# Altium footprint library rus.PcbLib: 72 footprints (part 3 of 5)
Each footprint in its own frame and in the unit in brackets; x right, y up, seen from the top. Pads: shape width x height; smd on the part's side, far side on the other; paste and mask are expansions set on the pad; w line width, h text height; cw(c..) or ccw(c..) is an arc to the next point about the centre after c.
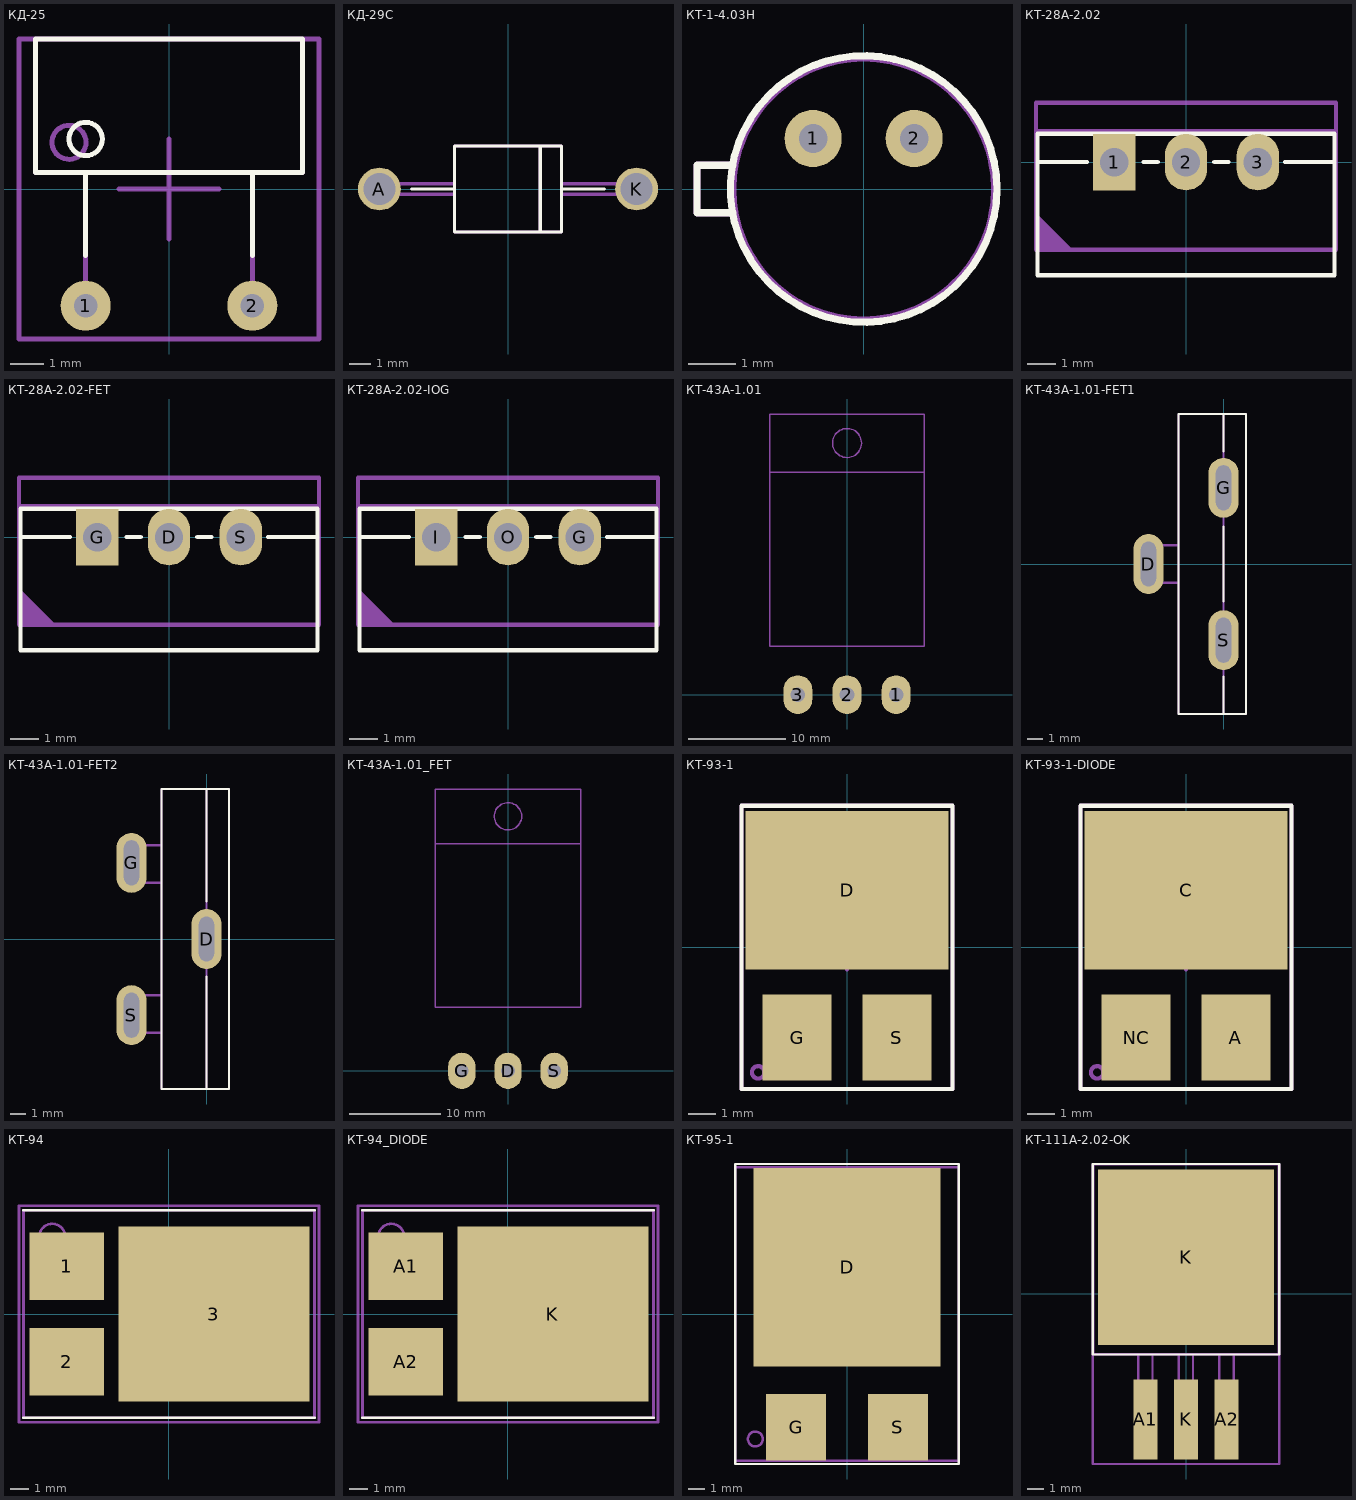
[diagram p2: the footprints below, top view; thin cyan lines are the x and y axes]

## КД-25 [mm]
height 4
pads (2):
  round 1.5 hole 0.7: 1(-2.5,-3.5) 2(2.5,-3.5)
Top Overlay:
  circle w0.15: c-2.5,1.5 r0.5
  lines w0.15: -2.5,-2 -2.5,0.5 ; 2.5,-2 2.5,0.5 ; -4,0.5 4,0.5 4,4.5 -4,4.5 -4,0.5
Mechanical 15:
  lines w0.15: -1.5,0 1.5,0 ; 0,-1.5 0,1.5 ; -4.5,-4.5 -4.5,4.5 4.5,4.5 4.5,-4.5 -4.5,-4.5
Mechanical 29:
  circle w0.15: c-3,1.4 r0.51
  lines w0.15: -2.5,-3.5 -2.5,0.5 ; 2.5,-3.5 2.5,0.5 ; -4,0.5 -4,4.5 4,4.5 4,0.5 -4,0.5
  text ".Designator" at -3.4,2.6 h1
3D body "КД-25.STEP": height 4, standoff -3, extent -4,-3.765 4,4.5

## КД-29С [mm]
height 5
pads (2):
  round 2 hole 1.5: A(-6,0) K(6,0)
Top Overlay:
  lines w0.15: -4.5,0 -2.5,0 ; 1.5,-2 1.5,2 ; 4.5,0 2.5,0 ; 2.5,0 2.5,-2 -2.5,-2 -2.5,2 2.5,2 2.5,0
Mechanical 29:
  lines w0.15: 1.5,-2 1.5,2 ; 2.5,-0.25 6,-0.25 6,0.25 2.5,0.25 ; -6,-0.25 -6,0.25 -2.5,0.25 -2.5,-0.25 -6,-0.25 ; -2.5,-2 -2.5,2 2.5,2 2.5,-2 -2.5,-2
  text ".Designator" at -2.3,-0.4 h1
3D body: height 4.3, standoff 0.7, extent -2.25,-1.799 2.15,1.8

## КТ-1-4.03Н [mm]
height 20
pads (2):
  round 1.2 hole 0.6: 1(-1.061,1.061) 2(1.061,1.061)
Top Overlay:
  circle w0.15: c0,0 r2.8
  lines w0.15: -2.75,-0.5 -3,-0.5 -3.5,-0.5 -3.5,0.5 -3,0.5 -2.75,0.5
Mechanical 29:
  circle w0.15: c0,0 r2.75
  lines w0.15: -2.75,-0.5 -3.5,-0.5 -3.5,0.5 -2.75,0.5
  text ".Designator" at -2.3,-0.4 h1
3D body: height 11, standoff -4, extent -1.259,0.861 -0.86,1.26
3D body: height 11, standoff -4, extent 0.862,0.861 1.261,1.26
3D body: height 15, standoff 10, extent -2.4,-2.399 2.4,2.399
3D body: height 10.5, standoff 10, extent -3.501,-2.801 2.801,2.801

## КТ-28А-2.02 [mm]
pads (3):
  rect 1.5x2 hole 1: 1(-2.54,0)
  oval 1.5x2 hole 1: 2(0,0) 3(2.54,0)
Top Overlay:
  lines w0.15: -5.25,0 -3.5,0 ; -1.5,0 -1,0 ; 1,0 1.5,0 ; 3.5,0 5.25,0 ; -5.25,-4 -5.25,-0.25 -5.25,1 5.25,1 5.25,-0.25 5.25,-4 0,-4 -5.25,-4
Mechanical 29:
  region: -5.3,-1.8 -5.3,-3.1 -4,-3.1
  lines w0.15: -5.3,1.1 5.3,1.1 ; -5.3,-3.1 5.3,-3.1 5.3,2.1 -5.3,2.1 -5.3,-3.1
  text ".Designator" at -3.7,-1.1 h1
3D body "KT-28F-2_02_6_5mm.step": height 22.5, standoff -2.5, extent -5.4,-3 5.4,2.2

## КТ-28А-2.02-FET [mm]
pads (3):
  oval 1.5x2 hole 1: D(0,0) S(2.54,0)
  rect 1.5x2 hole 1: G(-2.54,0)
Top Overlay:
  lines w0.15: -5.25,0 -3.5,0 ; -1.5,0 -1,0 ; 1,0 1.5,0 ; 3.5,0 5.25,0 ; -5.25,-4 0,-4 5.25,-4 5.25,-0.25 5.25,1 -5.25,1 -5.25,-0.25 -5.25,-4
Mechanical 29:
  region: -5.3,-1.8 -5.3,-3.1 -4,-3.1
  lines w0.15: -5.3,1.1 5.3,1.1 ; -5.3,-3.1 -5.3,2.1 5.3,2.1 5.3,-3.1 -5.3,-3.1
  text ".Designator" at -3.3,-1.1 h1
3D body "KT-28F-2_02_6_5mm.step": height 22.5, standoff -2.5, extent -5.4,-3 5.4,2.2

## КТ-28А-2.02-IOG [mm]
pads (3):
  oval 1.5x2 hole 1: G(2.54,0) O(0,0)
  rect 1.5x2 hole 1: I(-2.54,0)
Top Overlay:
  lines w0.15: -5.25,0 -3.5,0 ; -1.5,0 -1,0 ; 1,0 1.5,0 ; 3.5,0 5.25,0 ; -5.25,-4 -5.25,-0.25 -5.25,1 5.25,1 5.25,-0.25 5.25,-4 0,-4 -5.25,-4
Mechanical 29:
  region: -5.3,-1.8 -5.3,-3.1 -4,-3.1
  lines w0.15: -5.3,1.1 5.3,1.1 ; -5.3,-3.1 5.3,-3.1 5.3,2.1 -5.3,2.1 -5.3,-3.1
  text ".Designator" at -3.1,-1.2 h1
3D body "KT-28F-2_02_6_5mm.step": height 22.5, standoff -2.5, extent -5.4,-3 5.4,2.2

## КТ-43А-1.01 [mm]
height 5.3
pads (3):
  oval 3x4 hole 1.5: 1(5.08,0) 2(0,0) 3(-5.08,0)
Mechanical 13:
  circle w0.15: c0,26 r1.5
Mechanical 29:
  lines w0.15: -8,23 0,23 8,23 ; -8,5 -8,29 0,29 8,29 8,5 0,5 -8,5
  text ".Designator" at -2.7,14 h1
3D body "КТ-43А-1.01.STEP": height 3, standoff -7.3, extent -7.8,-0.25 7.8,28.75

## КТ-43А-1.01-FET1 [mm]
height 30
pads (3):
  oval 2x4 hole 1 slot 3 at 90 deg: D(-5,0) G(0,5.08) S(0,-5.08)
Top Overlay:
  lines w0.15: 0,-7.5 0,-10 ; 0,-2.5 0,2.5 ; 0,7.5 0,10 ; 0,-10 -3,-10 -3,10 0,10 ; 0,-10 1.5,-10 1.5,-7.5 1.5,7.5 1.5,8.5 1.5,10 0,10
Mechanical 29:
  lines w0.15: -3,-1.25 -5.25,-1.25 -5.25,1.25 -3,1.25 ; 0,-10 0,10 1.5,10 ; 1.5,10 1.5,-10 -3,-10 -3,10 1.5,10
  text ".Designator" at -1,-3.5 h1
3D body "КТ-43А-1.01-flex1.STEP": height 32, standoff -1.4, extent -5.2,-10 1.3,10

## КТ-43А-1.01-FET2 [mm]
height 30
pads (3):
  oval 2x4 hole 1 slot 3 at 90 deg: D(0,0) G(-5,5.08) S(-5,-5.08)
Top Overlay:
  lines w0.15: -0.1,10 1.25,10 1.5,10 1.5,-7.5 1.5,-10 0,-10 ; 0,-2.5 0,-10 ; 0,2.5 0,10 -3,10 -3,-10 0,-10
Mechanical 29:
  lines w0.15: -3,-6.25 -5.25,-6.25 -5.25,-3.75 -3,-3.75 ; -3,3.75 -5.25,3.75 -5.25,6.25 -3,6.25 ; 0,-10 0,10 1.5,10 ; 1.5,10 -3,10 -3,-10 1.5,-10 1.5,10
  text ".Designator" at -1.1,-3.4 h1
3D body "KT-43A-1.01-flex2.STEP": height 32, standoff -1.4, extent -5.3,-10 1.2,10

## КТ-43А-1.01_FET [mm] "КТ-43А-1.01 для полевых транзисторов"
height 5.3
pads (3):
  oval 3x4 hole 1.5: D(0,0) G(-5.08,0) S(5.08,0)
Mechanical 13:
  circle w0.15: c0,28 r1.5
Mechanical 29:
  lines w0.15: -8,25 0,25 8,25 ; -8,7 -8,31 0,31 8,31 8,7 0,7 -8,7
  text ".Designator" at -3.5,15.3 h1
3D body "КТ-43А-1.01.STEP": height 3, standoff -7.3, extent -7.8,-0.3 7.8,30.7

## КТ-93-1 [mm]
height 3
pads (3):
  rect 7.3x5.7 smd: D(0,2.05)
  rect 2.5x3.1 smd: G(-1.8,-3.25) S(1.8,-3.25)
Top Overlay:
  lines w0.15: -3.8,-5.1 -3.8,5.1 3.8,5.1 3.8,-5.1 -3.8,-5.1
Mechanical 15:
  lines w0.15: -0.9,0 0.9,0 ; 0,-0.8 0,0.8
Mechanical 29:
  circle w0.15: c-3.2,-4.5 r0.224
  lines w0.15: -3.8,-5.1 3.8,-5.1 3.8,5.1 -3.8,5.1 -3.8,-5.1
  text ".Designator" at -3.4,-0.3 h1
3D body: height 3, standoff 0, extent -3.85,-5.15 3.85,5.15

## КТ-93-1-DIODE [mm]
height 3
pads (3):
  rect 2.5x3.1 smd: A(1.8,-3.25) NC(-1.8,-3.25)
  rect 7.3x5.7 smd: C(0,2.05)
Top Overlay:
  lines w0.15: -3.8,-5.1 3.8,-5.1 3.8,5.1 -3.8,5.1 -3.8,-5.1
Mechanical 15:
  lines w0.15: -0.9,0 0.9,0 ; 0,-0.8 0,0.8
Mechanical 29:
  circle w0.15: c-3.2,-4.5 r0.224
  lines w0.15: -3.8,-5.1 -3.8,5.1 3.8,5.1 3.8,-5.1 -3.8,-5.1
  text ".Designator" at -2.7,-0.3 h1
3D body: height 3, standoff 0, extent -3.85,-5.15 3.85,5.15

## КТ-94 [mm] "DFN, 3-Leads, Body 11,53x16,10mm, Pitch 8,00mm, IPC Medium Density"
height 3.6
pads (3):
  rect 4.15x3.75 smd: 1(-5.7,2.665) 2(-5.7,-2.665)
  rect 10.65x9.75 smd: 3(2.5,0)
Top Overlay:
  lines w0.15: -8.1,-5.775 8.1,-5.775 ; -8.1,5.775 8.1,5.775
Mechanical 15:
  lines w0.15: -0.5,0 0.5,0 ; 0,-0.5 0,0.5 ; -8.35,-6.025 -8.35,6.025 8.35,6.025 8.35,-6.025 -8.35,-6.025
Mechanical 29:
  circle w0.15: c-6.5,4.3 r0.721
  lines w0.15: -8.1,-5.775 -8.1,5.775 8.1,5.775 8.1,-5.775 -8.1,-5.775
  text ".Designator" at -4.5,-0.7 h1
3D body: height 3.6, standoff 0.5, extent -8.1,-5.775 8.1,5.775

## КТ-94_DIODE [mm] "DFN, 3-Leads, Body 11,53x16,10mm, Pitch 8,00mm, IPC Medium Density"
height 3.6
pads (3):
  rect 4.15x3.75 smd: A1(-5.7,2.665) A2(-5.7,-2.665)
  rect 10.65x9.75 smd: K(2.5,0)
Top Overlay:
  lines w0.15: -8.1,-5.775 8.1,-5.775 ; -8.1,5.775 8.1,5.775
Mechanical 15:
  lines w0.15: -0.5,0 0.5,0 ; 0,-0.5 0,0.5 ; -8.35,-6.025 8.35,-6.025 8.35,6.025 -8.35,6.025 -8.35,-6.025
Mechanical 29:
  circle w0.15: c-6.5,4.3 r0.721
  lines w0.15: -8.1,-5.775 8.1,-5.775 8.1,5.775 -8.1,5.775 -8.1,-5.775
  text ".Designator" at -3.3,-0.4 h1
3D body: height 3.6, standoff 0.5, extent -8.1,-5.775 8.1,5.775

## КТ-95-1 [mm]
height 3.6
pads (3):
  rect 11.2x11.9 smd: D(0,2.8)
  rect 3.6x4 smd: G(-3.05,-6.8) S(3.05,-6.8)
Top Overlay:
  lines w0.15: -6.7,-9 6.7,-9 6.7,9 -6.7,9 -6.7,-9
Mechanical 15:
  lines w0.15: -0.8,0 0.8,0 ; 0,-0.8 0,0.8
Mechanical 29:
  circle w0.15: c-5.5,-7.5 r0.447
  lines w0.15: -6.7,-8.8 6.7,-8.8 6.7,8.8 -6.7,8.8 -6.7,-8.8
  text ".Designator" at -3.8,-0.5 h1
3D body "KT-95-1.STEP": height 3.6, standoff 0, extent -6.7,-8.8 6.7,8.8

## КТ-111А-2.02-OK [mm]
height 4.5
pads (4):
  rect 1.5x5 smd: A1(-2.54,-7.874) A2(2.54,-7.874) K(0,-7.874)
  rect 11x11 smd: K(0,2.286)
Top Overlay:
  lines w0.15: -5.842,-3.81 5.842,-3.81 ; -5.842,-3.81 -5.842,8.128 5.842,8.128 5.842,-3.81 ; -5.842,-3.81 5.842,-3.81
Mechanical 15:
  lines w0.15: -1.27,0 1.27,0 ; 0,-1.27 0,1.27 ; -5.842,-10.668 5.842,-10.668 5.842,8.128 -5.842,8.128 -5.842,-10.668
Mechanical 29:
  lines w0.15: -5.8,-3.8 5.8,-3.8 5.8,8.1 -5.8,8.1 -5.8,-3.8 ; -3,-9.9 -3,-3.8 -2.1,-3.8 -2.1,-9.9 -3,-9.9 ; -0.46,-9.9 0.44,-9.9 0.44,-3.8 -0.46,-3.8 -0.46,-9.9 ; 2.08,-9.9 2.98,-9.9 2.98,-3.8 2.08,-3.8 2.08,-9.9
  text ".Designator" at -3.3,0.5 h1